# Altium footprint library jig.PcbLib: 30 footprints (part 2 of 2)
Each footprint in its own frame and in the unit in brackets; x right, y up, seen from the top. Pads: shape width x height; smd on the part's side, far side on the other; paste and mask are expansions set on the pad; w line width, h text height; cw(c..) or ccw(c..) is an arc to the next point about the centre after c.
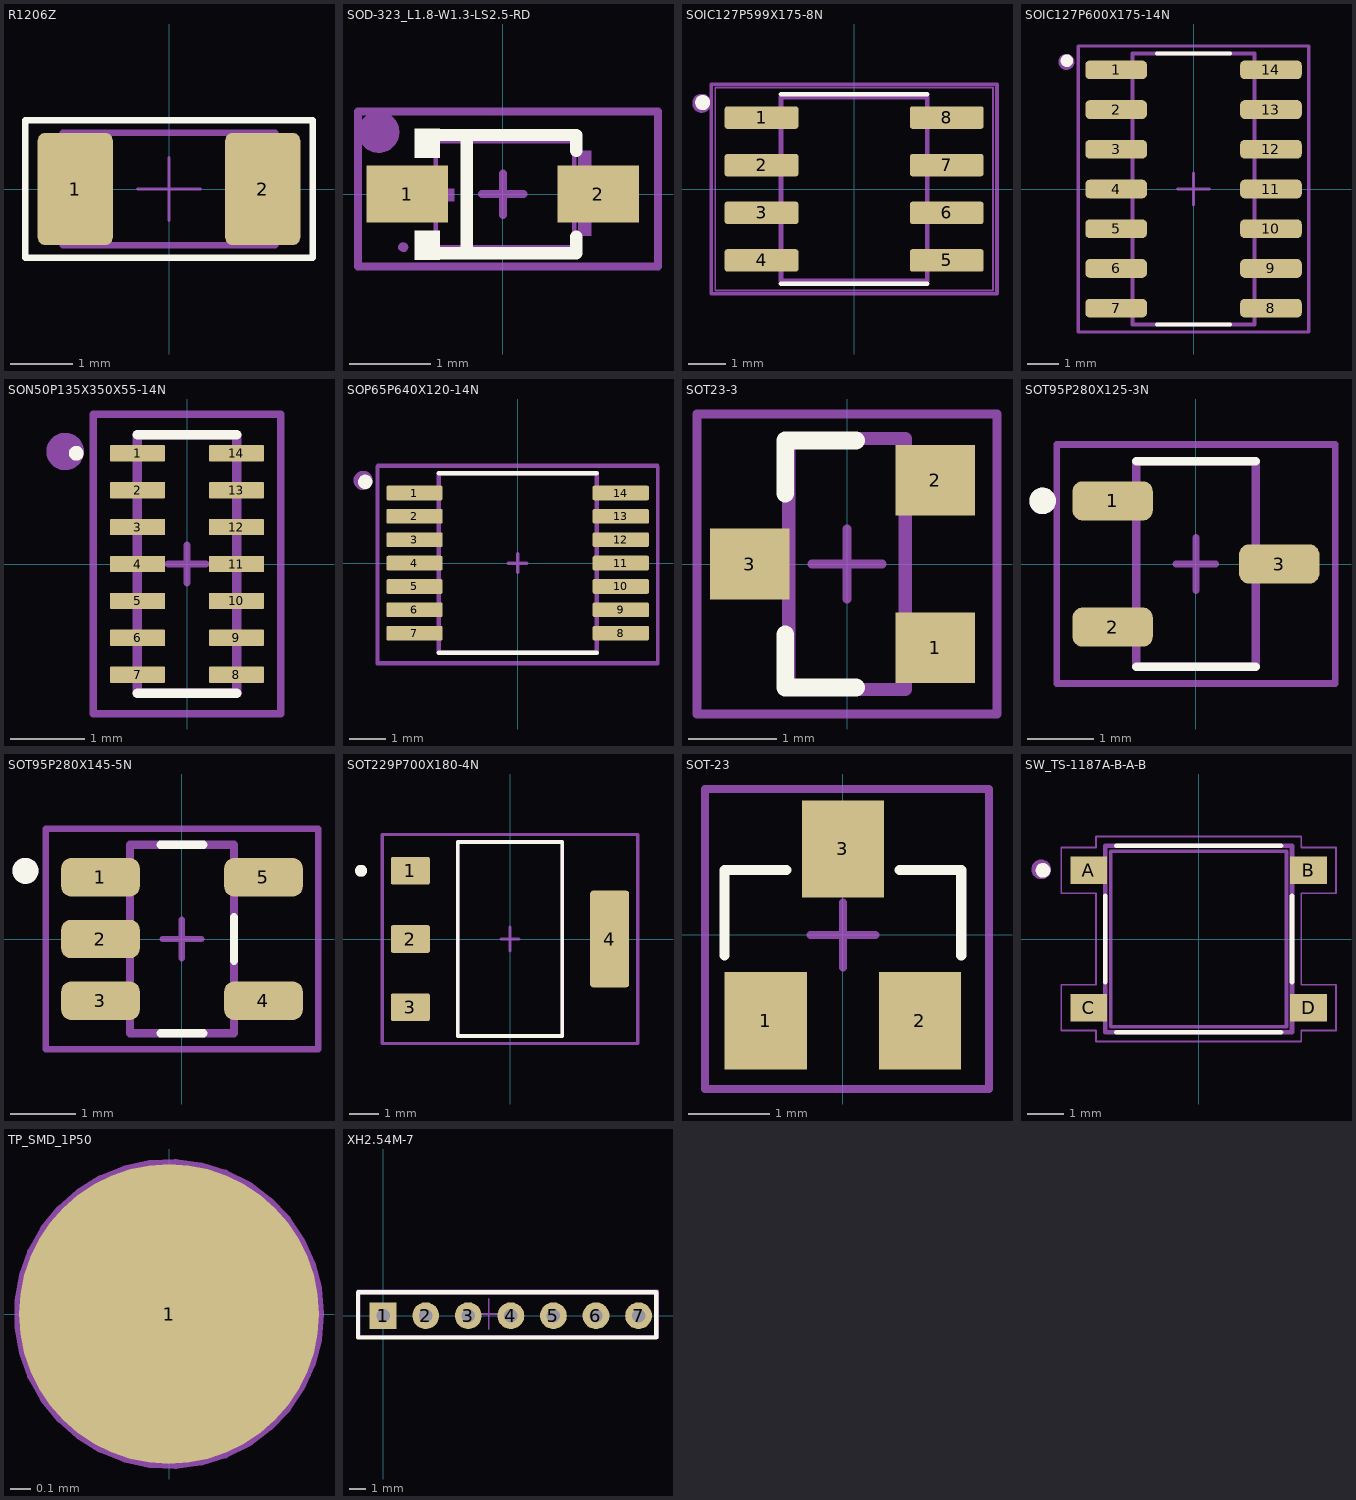
[diagram p1: the footprints below, top view; thin cyan lines are the x and y axes]

## R1206Z [mm]
height 0.7
pads (2):
  rrect20% 1.2x1.8 smd paste+0 mask+0.05: 1(-1.5,0) 2(1.5,0)
Top Overlay:
  lines w0.1: -2.3,-1.1 2.3,-1.1 2.3,1.1 -2.3,1.1 -2.3,-1.1
Mechanical 5:
  lines w0.1: -1.7,-0.9 -1.7,0.9 1.7,0.9 1.7,-0.9 -1.7,-0.9
  text ".Designator" at -1.475,-0.4 h0.81
Mechanical 13:
  lines w0.1: -1.2,-0.9 -1.2,0.9 ; 1.2,-0.9 1.2,0.9 ; -1.7,-0.9 -1.7,0.9 1.7,0.9 1.7,-0.9 -1.7,-0.9
Top Component Center (Mech15):
  lines w0.05: -0.5,0 0.5,0 ; 0,-0.5 0,0.5 ; -2.3,-1.1 -2.3,1.1 2.3,1.1 2.3,-1.1 -2.3,-1.1
3D body: height 1.35, standoff 0, extent 1.201,-0.899 1.699,0.899
3D body: height 1.35, standoff 0, extent -1.199,-0.899 1.199,0.899
3D body: height 1.35, standoff 0, extent -1.699,-0.899 -1.201,0.899

## SOD-323_L1.8-W1.3-LS2.5-RD [mm]
pads (2):
  rect 1.001x0.701 smd: 1(-1.171,0) 2(1.173,0)
Top Overlay:
  region: -0.775,-0.803 -0.775,-0.45 -1.079,-0.45 -1.079,-0.803
  region: -0.775,0.803 -0.775,0.45 -1.079,0.45 -1.079,0.803
  lines w0.152: -0.851,-0.726 0.902,-0.726 0.902,-0.521 ; -0.851,0.726 0.902,0.726 0.902,0.531 ; -0.445,-0.726 -0.445,0.726
Mechanical 5:
  circle w0.254: c-1.524,0.762 r0.127
  lines w0.1: -1.778,1.016 -1.778,-0.889 1.905,-0.889 1.905,1.016 -1.762,1.016
  text ".Designator" at -0.381,-0.127 h1.52
Mechanical 6:
  region: 1.085,0.531 1.085,-0.511 0.927,-0.511 0.927,0.531
  region: 1.316,0.089 1.316,-0.066 0.691,-0.066 0.691,0.089
  region: -1.224,0.069 -1.224,-0.086 -0.599,-0.086 -0.599,0.069
Mechanical 7:
  lines w0.051: -0.823,-0.65 0.876,-0.65 0.876,0.65 -0.823,0.65 -0.823,-0.65
Mechanical 8:
  region: -1.163,-0.65 -1.173,-0.683 -1.199,-0.706 -1.232,-0.709 -1.262,-0.696 -1.283,-0.668 -1.283,-0.632 -1.262,-0.605 -1.232,-0.592 -1.199,-0.597 -1.173,-0.617
Mechanical 9:
  region: -0.925,0.16 -0.925,-0.16 -1.224,-0.16 -1.224,0.16
  region: 1.275,0.16 1.275,-0.16 0.975,-0.16 0.975,0.16
Mechanical 10:
  region: -0.813,0.16 -0.813,-0.16 -0.935,-0.16 -0.935,0.16
  region: 0.986,0.16 0.986,-0.16 0.866,-0.16 0.866,0.16
Top Component Center (Mech15):
  lines w0.1: -0.254,0 0.254,0 ; 0,-0.254 0,0.254 0,0.127 ; -1.778,-0.889 -1.778,1.016 1.905,1.016 1.905,-0.889 -1.778,-0.889
3D body "SOD323.step": height 0.95, standoff 0.02, extent -1.244,-0.6 1.244,0.65

## SOIC127P599X175-8N [mm]
pads (8):
  rrect25% 1.97x0.6 smd paste+0 mask+0.102: 1(-2.47,1.905) 2(-2.47,0.635) 3(-2.47,-0.635) 4(-2.47,-1.905) 5(2.47,-1.905) 6(2.47,-0.635) 7(2.47,0.635) 8(2.47,1.905)
Top Overlay:
  circle w0.2: c-4.04,2.305 r0.1
  lines w0.127: -1.95,-2.525 1.95,-2.525 ; -1.95,2.525 1.95,2.525
Mechanical 5:
  circle w0.254: c-4.064,2.286 r0.127
  lines w0.1: -3.81,-2.794 -3.81,2.794 3.81,2.794 3.81,-2.794 -3.81,-2.794
  text ".Designator" at -0.254,0 h1.52
Mechanical 13:
  circle w0.2: c-4.04,2.305 r0.1
  lines w0.127: -1.95,-2.452 1.95,-2.452 1.95,2.452 -1.95,2.452 -1.95,-2.452
Top Component Center (Mech15):
  lines w0.05: -3.705,-2.702 3.705,-2.702 3.705,2.702 -3.705,2.702 -3.705,-2.702
3D body "step_temp.STEP": height 1.75, standoff 0, extent -2.995,-2.452 2.995,2.452

## SOIC127P600X175-14N [mm]
pads (14):
  rrect50% 1.97x0.6 smd paste+0 mask+0.102: 1(-2.475,3.81) 2(-2.475,2.54) 3(-2.475,1.27) 4(-2.475,0) 5(-2.475,-1.27) 6(-2.475,-2.54) 7(-2.475,-3.81) 8(2.475,-3.81) 9(2.475,-2.54) 10(2.475,-1.27) 11(2.475,0) 12(2.475,1.27) 13(2.475,2.54) 14(2.475,3.81)
Top Overlay:
  circle w0.2: c-4.05,4.1 r0.1
  lines w0.127: -1.17,-4.325 1.17,-4.325 ; -1.17,4.325 1.17,4.325
Mechanical 5:
  circle w0.254: c-4.064,4.064 r0.127
  lines w0.1: -3.683,-4.572 -3.683,4.572 3.683,4.572 3.683,-4.572 -3.683,-4.572
  text ".Designator" at -0.635,-0.127 h1.52
Mechanical 13:
  circle w0.2: c-4.05,4.1 r0.1
  lines w0.127: -1.95,-4.325 -1.95,4.325 1.95,4.325 1.95,-4.325 -1.95,-4.325
Top Component Center (Mech15):
  lines w0.05: -3.71,-4.575 -3.71,4.575 3.71,4.575 3.71,-4.575 -3.71,-4.575
  lines w0.1: -0.508,0 0.508,0 ; 0,-0.508 0,0.508
3D body "step_temp.STEP": height 1.75, standoff 0, extent -3,-4.325 3,4.325

## SON50P135X350X55-14N [mm]
pads (14):
  rrect6% 0.74x0.22 smd: 1(-0.67,1.5) 2(-0.67,1) 3(-0.67,0.5) 4(-0.67,0) 5(-0.67,-0.5) 6(-0.67,-1) 7(-0.67,-1.5) 8(0.67,-1.5) 9(0.67,-1) 10(0.67,-0.5) 11(0.67,0) 12(0.67,0.5) 13(0.67,1) 14(0.67,1.5)
Top Overlay:
  circle w0.1: c-1.5,1.5 r0.05
  lines w0.127: -0.675,-1.75 0.675,-1.75 ; -0.675,1.75 0.675,1.75
Mechanical 5:
  circle w0.254: c-1.651,1.524 r0.127
  lines w0.1: -1.27,-2.032 1.27,-2.032 1.27,2.032 -1.27,2.032 -1.27,-2.032
  text ".Designator" at -0.127,0 h1.52
Mechanical 13:
  circle w0.1: c-0.9,1.5 r0.05
  lines w0.127: -0.675,-1.75 -0.675,1.75 0.675,1.75 0.675,-1.75 -0.675,-1.75
Top Component Center (Mech15):
  lines w0.05: -1.29,-2 -1.29,2 1.29,2 1.29,-2 -1.29,-2
  lines w0.1: -0.254,0 0.254,0 ; 0,-0.254 0,0.254
3D body "step_temp.STEP": height 0.55, standoff 0, extent -0.675,-1.75 0.675,1.75

## SOP65P640X120-14N [mm]
pads (14):
  rrect25% 1.57x0.41 smd: 1(-2.87,1.95) 2(-2.87,1.3) 3(-2.87,0.65) 4(-2.87,0) 5(-2.87,-0.65) 6(-2.87,-1.3) 7(-2.87,-1.95) 8(2.87,-1.95) 9(2.87,-1.3) 10(2.87,-0.65) 11(2.87,0) 12(2.87,0.65) 13(2.87,1.3) 14(2.87,1.95)
Top Overlay:
  circle w0.2: c-4.24,2.26 r0.1
  lines w0.127: -2.2,-2.5 2.2,-2.5 ; -2.2,2.5 2.2,2.5
Mechanical 5:
  circle w0.254: c-4.3,2.3 r0.141
  lines w0.1: -3.9,-2.8 -3.9,2.7 3.9,2.7 3.9,-2.8 -3.9,-2.8
  text ".Designator" at -0.5,-0.1 h1.52
Mechanical 13:
  circle w0.2: c-4.24,2.26 r0.1
  lines w0.127: -2.2,-2.5 -2.2,2.5 2.2,2.5 2.2,-2.5 -2.2,-2.5
Top Component Center (Mech15):
  lines w0.05: -3.905,-2.75 -3.905,2.75 3.905,2.75 3.905,-2.75 -3.905,-2.75
  lines w0.1: -0.254,0 0.254,0 ; 0,-0.254 0,0.254
3D body "step_temp.STEP": height 1.2, standoff 0, extent -3.2,-2.5 3.2,2.5

## SOT23-3 [mm]
pads (3):
  rect 0.9x0.8 smd: 1(1,-0.95) 2(1,0.95) 3(-1.1,0)
Top Overlay:
  lines w0.203: -0.7,-0.8 -0.7,-1.4 0.1,-1.4 ; -0.7,0.8 -0.7,1.4 0.1,1.4
Mechanical 5:
  lines w0.1: -1.7,-1.7 -1.7,1.6 -1.7,1.693 -1.693,1.7 1.7,1.7 1.7,-1.7 -1.7,-1.7
  text ".Designator" at -0.3,0 h1.52
Mechanical 13:
  lines w0.152: -0.66,-1.422 0.66,-1.422 0.66,1.422 -0.66,1.422 -0.66,-1.422
Top Component Center (Mech15):
  lines w0.1: -0.4,0 0.4,0 ; 0,-0.4 0,0.4 ; -1.7,-1.7 -1.7,1.7 1.7,1.7 1.7,-1.7 -1.7,-1.7
3D body "step_temp.STEP": height 1.25, standoff 0, extent -1.4,-1.45 1.4,1.45

## SOT95P280X125-3N [mm]
height 1.25
pads (3):
  rrect50% 1.21x0.59 smd: 1(-1.255,0.95) 2(-1.255,-0.95) 3(1.255,0)
Top Overlay:
  circle w0.2: c-2.31,0.95 r0.1
  lines w0.127: -0.9,-1.55 0.9,-1.55 ; -0.9,1.55 0.9,1.55
Mechanical 5:
  lines w0.1: -2.1,-1.8 -2.1,1.8 2.1,1.8 2.1,-1.8 -2.1,-1.8
  text ".Designator" at -0.2,0 h1.52
Mechanical 13:
  circle w0.2: c-2.31,0.95 r0.1
  lines w0.127: -0.9,-1.55 0.9,-1.55 0.9,1.55 -0.9,1.55 -0.9,-1.55
Top Component Center (Mech15):
  lines w0.05: -2.11,-1.8 2.11,-1.8 2.11,1.8 -2.11,1.8 -2.11,-1.8
  lines w0.1: -0.3,0 0.3,0 ; 0,-0.4 0,0.4
3D body "step_temp.STEP": height 1.25, standoff 0, extent -1.4,-1.45 1.4,1.45

## SOT95P280X145-5N [mm]
pads (5):
  rrect50% 1.21x0.59 smd: 1(-1.255,0.95) 2(-1.255,0) 3(-1.255,-0.95) 4(1.255,-0.95) 5(1.255,0.95)
Top Overlay:
  circle w0.2: c-2.41,1.05 r0.1
  lines w0.127: -0.33,-1.45 0.33,-1.45 ; -0.33,1.45 0.33,1.45 ; 0.8,-0.335 0.8,0.335
Mechanical 5:
  lines w0.1: -2.1,-1.7 2.1,-1.7 2.1,1.7 -2.1,1.7 -2.1,-1.7
  text ".Designator" at -0.3,0 h1.52
Mechanical 13:
  circle w0.2: c-2.41,1.05 r0.1
  lines w0.127: -0.8,-1.45 -0.8,1.45 0.8,1.45 0.8,-1.45 -0.8,-1.45
Top Component Center (Mech15):
  lines w0.05: -2.11,-1.7 2.11,-1.7 2.11,1.7 -2.11,1.7 -2.11,-1.7
  lines w0.1: -0.3,0 0.3,0 ; 0,-0.3 0,0.3
3D body "step_temp.STEP": height 1.45, standoff 0, extent -1.4,-1.45 1.4,1.45

## SOT229P700X180-4N [mm]
height 1.8
pads (4):
  rrect15% 1.31x0.93 smd: 1(-3.345,2.29) 2(-3.345,0) 3(-3.345,-2.29)
  rrect15% 1.31x3.24 smd: 4(3.345,0)
Top Overlay:
  circle w0.2: c-5,2.29 r0.1
  lines w0.127: -1.753,-3.253 1.753,-3.253 1.753,3.253 -1.753,3.253 -1.753,-3.253
Mechanical 5:
  lines w0.1: -4.3,-3.5 -4.3,3.5 4.3,3.5 4.3,-3.5 -4.3,-3.5
  text ".Designator" at -0.5,0 h1.52
Mechanical 13:
  circle w0.2: c-5,2.29 r0.1
  lines w0.127: -1.753,-3.253 1.753,-3.253 1.753,3.253 -1.753,3.253 -1.753,-3.253
Top Component Center (Mech15):
  lines w0.05: -4.25,-3.502 -4.25,3.502 4.25,3.502 4.25,-3.502 -4.25,-3.502
  lines w0.1: -0.3,0 0.3,0 ; 0,-0.4 0,0.4
3D body "step_temp.STEP": height 1.8, standoff 0, extent -3.499,-3.251 3.499,3.251

## SOT-23 [mm]
pads (3):
  rect 1.016x1.2 smd: 1(-0.95,-1.06) 2(0.95,-1.06) 3(0,1.06)
Top Overlay:
  lines w0.127: -1.46,-0.254 -1.46,0.8 -0.699,0.8 ; 0.699,0.8 1.46,0.8 1.46,-0.254
Mechanical 5:
  lines w0.1: -1.7,-1.9 1.8,-1.9 1.8,1.8 -1.7,1.8 -1.7,-1.9
  text ".Designator" at -0.4,0 h1.52
Mechanical 13:
  region: -0.711,-1.423 -1.169,-1.423 -1.169,-0.838 -0.711,-0.838
  region: 1.168,-1.424 0.712,-1.424 0.712,-0.838 1.168,-0.838
  region: 0.229,0.839 -0.229,0.839 -0.229,1.422 0.229,1.422
Top Component Center (Mech15):
  lines w0.1: -0.4,0 0.4,0 ; 0,-0.4 0,0.4 ; -1.7,-1.9 1.8,-1.9 1.8,1.8 -1.7,1.8 -1.7,-1.9
3D body "step_temp.STEP": height 1.3, standoff 0, extent -1.45,-1.4 1.45,1.4

## SW_TS-1187A-B-A-B [mm]
pads (4):
  rect 1x0.75 smd: A(-3,1.875) B(3,1.875) C(-3,-1.875) D(3,-1.875)
Top Overlay:
  circle w0.2: c-4.25,1.875 r0.1
  lines w0.127: -2.55,-1.18 -2.55,1.18 ; -2.25,-2.55 2.25,-2.55 ; -2.25,2.55 2.25,2.55 ; 2.55,-1.18 2.55,1.18
Mechanical 5:
  circle w0.254: c-4.3,1.9 r0.141
  lines w0.1: -2.4,-2.4 -2.4,2.4 2.4,2.4 2.4,-2.4 -2.4,-2.4
  text ".Designator" at -0.6,-0.2 h1.52
Mechanical 13:
  circle w0.2: c-4.25,1.875 r0.1
  lines w0.127: -2.55,-2.55 -2.55,2.55 2.55,2.55 2.55,-2.55 -2.55,-2.55
Top Component Center (Mech15):
  lines w0.05: -3.75,-2.5 -3.75,-1.25 -2.8,-1.25 -2.8,1.25 -3.75,1.25 -3.75,2.5 -2.8,2.5 -2.8,2.8 2.8,2.8 2.8,2.5 3.75,2.5 3.75,1.25 2.8,1.25 2.8,-1.25 3.75,-1.25 3.75,-2.5 2.8,-2.5 2.8,-2.8 -2.8,-2.8 -2.8,-2.5 -3.75,-2.5
3D body "TS-1187A-B-A-B--3DModel-STEP-56544.STEP": height 1.55, standoff 0, extent -3.25,-2.55 3.25,2.55

## TP_SMD_1P50 [mm] "Single 1.50 mm round top-layer copper test point for probing"
pads (1):
  round 1.5 smd: 1(0,0)
Mechanical 1:
  circle w0.051: c0,0 r0.75

## XH2.54M-7 [mm]
pads (7):
  rect 1.6x1.6 hole 0.8: 1(0,0)
  round 1.6 hole 0.8: 2(2.54,0) 3(5.08,0) 4(7.62,0) 5(10.16,0) 6(12.7,0) 7(15.24,0)
Top Overlay:
  lines w0.254: -1.5,-1.3 -1.5,1.4 16.3,1.4 16.3,-1.3 -1.5,-1.3
Mechanical 5:
  lines w0.1: -1.4,-1.2 16.4,-1.2 16.4,1.3 -1.4,1.3 -1.4,-1.2
  text ".Designator" at 6.1,-0.1 h1.52
Top Component Center (Mech15):
  lines w0.1: 5.2,0.1 7.4,0.1 ; 6.3,-0.8 6.3,1 ; -1.5,-1.3 -1.5,1.5 16.4,1.5 16.4,-1.3 -1.5,-1.3
3D body "pin_header_7.STEP": height 10.62, standoff -3.38, extent -1.471,-1.21 16.309,1.33